# Altium integrated library 54-00005.IntLib: 1 symbol
Pins are listed as number, name and electrical type; pins without a type are passive.

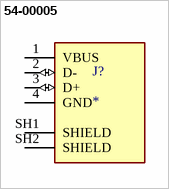
[diagram p0: symbol 54-00005]

## 54-00005
designator J?
Connector, USB A Jack, PCB mount, 180 degrees, nickel shell, board lock, black insulator, tray; MF: Tensility International Corp; MP: 54-00005; SnapEDA_Link: https://www.snapeda.com/parts/54-00005/Tensility/view-part/?ref=snap; Package: None; Value: *; Check_prices: https://www.snapeda.com/parts/54-00005/Tensility/view-part/?ref=eda
footprint TENSILITY_54-00005
pins: 1 VBUS (power), 2 D- (io), 3 D+ (io), 4 GND (power), SH1 SHIELD, SH2 SHIELD